# EAGLE library part SW4_DEV (library evfcam_mvp)
5-way navigation switch, Adafruit 504
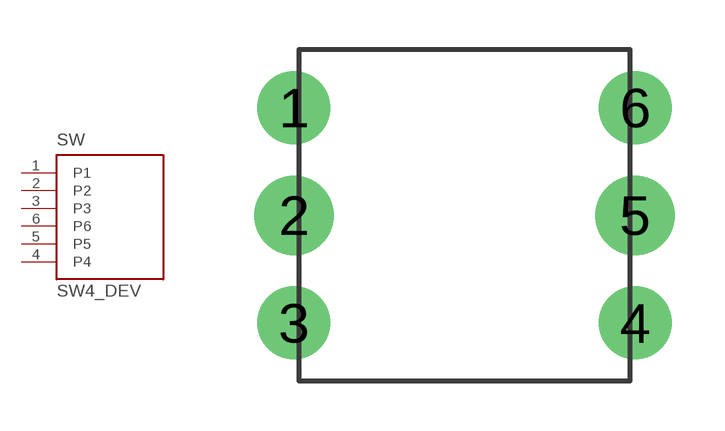
[diagram p1: symbol with the pads of SW4_PKG; footprint SW4_PKG]

Designator prefix SW

## SW4_DEV  [SW4_PKG]
1  P1  pas
2  P2  pas
3  P3  pas
4  P4  pas
5  P5  pas
6  P6  pas

## Footprint SW4_PKG (pad centres in mm)
5-way navigation switch, Adafruit 504
drill 1.2 pad 2.2 round: 1 -5.15,3.25; 3 -5.15,-3.25; 4 5.15,-3.25; 6 5.15,3.25
drill 1.4 pad 2.4 round: 2 -5.15,0; 5 5.15,0